# Altium schematic symbol library 网口芯片KSZ8081RNA.SCHLIB: 1 symbol
Pins are listed as number, name and electrical type; pins without a type are passive.

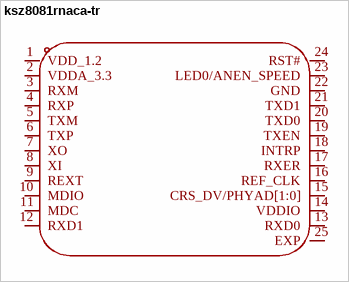
[diagram p0: symbol ksz8081rnaca-tr]

## ksz8081rnaca-tr
designator U??  (value not drawn)
类型:PHY收发器;端口数量:1;MAC接口:RMII;; Manufacturer: MICROCHIP(美国微芯); AddInBom: yes; ModelId: 1e6a51e223ba431598528b34e5bdfcc9; ModelName: QFN-24_L4.0-W4.0-H0.9-P0.50; ModelTransform: 157.48,157.48,0,90,0,0,0,0,0; Number of ports: 1; MAC Interface: RMII; Ethernet Speed Standards: 10BASE-T；100BASE-TX; Data Rate: 10Mbit/s；100Mbit/s; Voltage - Supply: 3.3V; Symbol: KSZ8081RNACA-TR; LCSC Part Name: KSZ8081RNA/RND 10BASE-T/100BASE-TX PHY 收发器; SupplierPart: C100017; ManufacturerPart: KSZ8081RNACA-TR; Supplier Footprint: QFN-24-EP(4x4); JLCPCB Part Class: Extended Part; Datasheet: https://item.szlcsc.com/datasheet/KSZ8081RNACA-TR/101231.html; Supplier: LCSC; ConvertToPcb: yes; FootprintName: QFN-24_L4.0-W4.0-P0.50-BL-EP2.6; Type: PHY收发器; Operating Temperature: 0℃~+70℃; Features: 错误检测与恢复；低功耗模式；可编程LED指示；电缆诊断
footprint QFN-24_L4.0-W4.0-P0.50-BL-EP2.6
pins: 1 VDD_1.2, 2 VDDA_3.3, 3 RXM, 4 RXP, 5 TXM, 6 TXP, 7 XO, 8 XI, 9 REXT, 10 MDIO, 11 MDC, 12 RXD1, 13 RXD0, 14 VDDIO, 15 CRS_DV/PHYAD[1:0], 16 REF_CLK, 17 RXER, 18 INTRP, 19 TXEN, 20 TXD0, 21 TXD1, 22 GND, 23 LED0/ANEN_SPEED, 24 RST#, 25 EXP